# Altium footprint library Anten-Tracker.PcbLib: 36 footprints (part 2 of 3)
Each footprint in its own frame and in the unit in brackets; x right, y up, seen from the top. Pads: shape width x height; smd on the part's side, far side on the other; paste and mask are expansions set on the pad; w line width, h text height; cw(c..) or ccw(c..) is an arc to the next point about the centre after c.
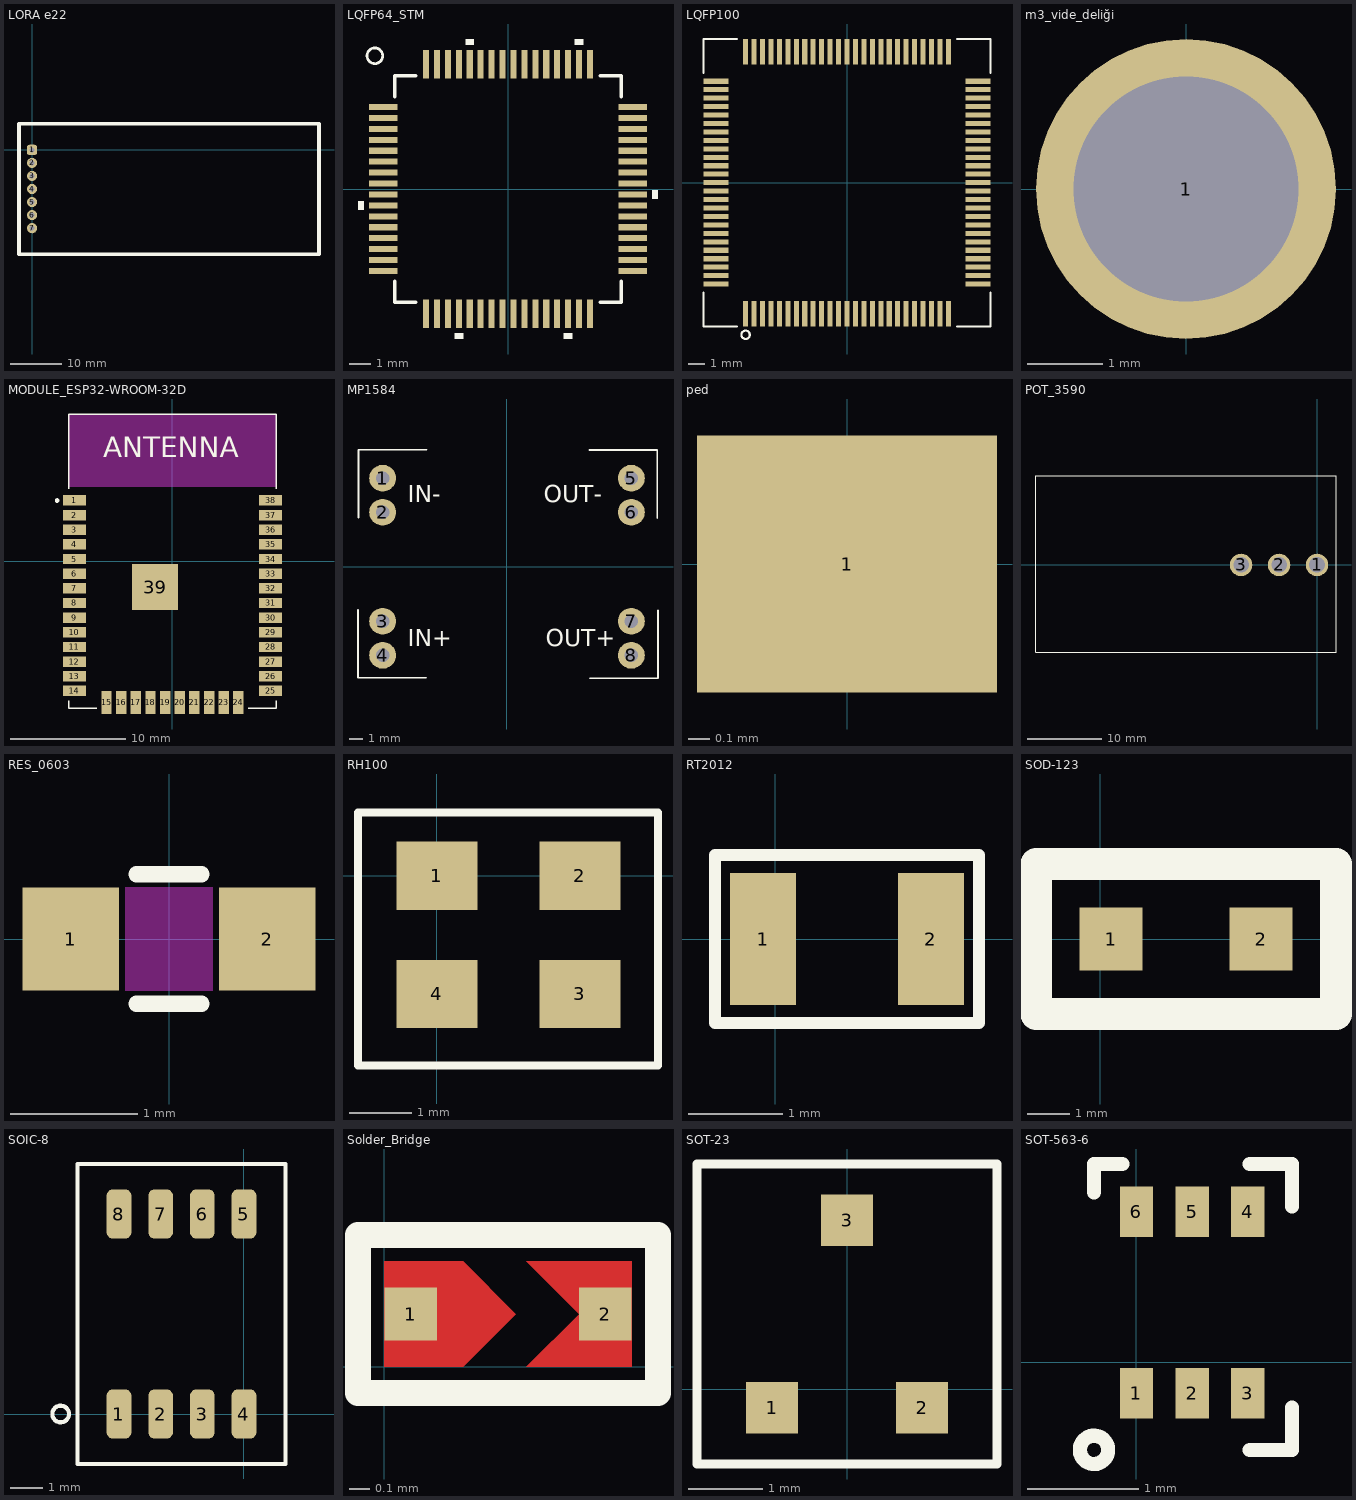
[diagram p1: the footprints below, top view; thin cyan lines are the x and y axes]

## LORA e22 [mm]
pads (7):
  rrect50% 2x2 hole 1 mask+0.05: 1(0,0)
  round 2 hole 1 mask+0.05: 2(0,-2.54) 3(0,-5.08) 4(0,-7.62) 5(0,-10.16) 6(0,-12.7) 7(0,-15.24)
Top Overlay:
  lines w0.762: -2.54,-20.32 55.88,-20.32 55.88,5.08 -2.54,5.08 -2.54,-20.32
3D body "E22-400T30D.STEP": height 8.1, standoff -5.52, extent -1.524,-19.428 53.976,4.572

## LQFP64_STM [mm]
pads (64):
  rect 1.302x0.279 smd paste-1 mask+0.508: 1(-5.706,3.75) 2(-5.706,3.25) 3(-5.706,2.75) 4(-5.706,2.25) 5(-5.706,1.75) 6(-5.706,1.25) 7(-5.706,0.75) 8(-5.706,0.25) 9(-5.706,-0.25) 10(-5.706,-0.75) 11(-5.706,-1.25) 12(-5.706,-1.75) 13(-5.706,-2.25) 14(-5.706,-2.75) 15(-5.706,-3.25) 16(-5.706,-3.75) 33(5.706,-3.75) 34(5.706,-3.25) 35(5.706,-2.75) 36(5.706,-2.25) 37(5.706,-1.75) 38(5.706,-1.25) 39(5.706,-0.75) 40(5.706,-0.25) 41(5.706,0.25) 42(5.706,0.75) 43(5.706,1.25) 44(5.706,1.75) 45(5.706,2.25) 46(5.706,2.75) 47(5.706,3.25) 48(5.706,3.75)
  rect 0.279x1.302 smd paste-1 mask+0.508: 17(-3.75,-5.706) 18(-3.25,-5.706) 19(-2.75,-5.706) 20(-2.25,-5.706) 21(-1.75,-5.706) 22(-1.25,-5.706) 23(-0.75,-5.706) 24(-0.25,-5.706) 25(0.25,-5.706) 26(0.75,-5.706) 27(1.25,-5.706) 28(1.75,-5.706) 29(2.25,-5.706) 30(2.75,-5.706) 31(3.25,-5.706) 32(3.75,-5.706) 49(3.75,5.706) 50(3.25,5.706) 51(2.75,5.706) 52(2.25,5.706) 53(1.75,5.706) 54(1.25,5.706) 55(0.75,5.706) 56(0.25,5.706) 57(-0.25,5.706) 58(-0.75,5.706) 59(-1.25,5.706) 60(-1.75,5.706) 61(-2.25,5.706) 62(-2.75,5.706) 63(-3.25,5.706) 64(-3.75,5.706)
Top Overlay:
  circle w0.127: c-6.096,6.096 r0.359
  region: -1.559,6.611 -1.94,6.611 -1.94,6.865 -1.559,6.865
  region: 3.441,6.611 3.06,6.611 3.06,6.865 3.441,6.865
  region: 6.611,-0.059 6.865,-0.059 6.865,-0.44 6.611,-0.44
  region: 2.94,-6.611 2.559,-6.611 2.559,-6.865 2.94,-6.865
  region: -2.06,-6.611 -2.441,-6.611 -2.441,-6.865 -2.06,-6.865
  region: -6.611,-0.56 -6.865,-0.56 -6.865,-0.941 -6.611,-0.941
  lines w0.152: -5.182,-4.222 -5.182,-5.182 -4.222,-5.182 ; -5.182,4.222 -5.182,5.182 -4.222,5.182 ; 4.222,-5.182 5.182,-5.182 5.182,-4.222 ; 4.222,5.182 5.182,5.182 5.182,4.222
3D body "LQFP64_STM.step": height 1.6, standoff 0, extent -6.007,-6.007 6.007,6.007

## LQFP100 [mm]
pads (100):
  rect 0.3x1.5 smd paste-1 mask+0.102: 1(-6,-7.75) 2(-5.5,-7.75) 3(-5,-7.75) 4(-4.5,-7.75) 5(-4,-7.75) 6(-3.5,-7.75) 7(-3,-7.75) 8(-2.5,-7.75) 9(-2,-7.75) 10(-1.5,-7.75) 11(-1,-7.75) 12(-0.5,-7.75) 13(0,-7.75) 14(0.5,-7.75) 15(1,-7.75) 16(1.5,-7.75) 17(2,-7.75) 18(2.5,-7.75) 19(3,-7.75) 20(3.5,-7.75) 21(4,-7.75) 22(4.5,-7.75) 23(5,-7.75) 24(5.5,-7.75) 25(6,-7.75) 51(6,7.75) 52(5.5,7.75) 53(5,7.75) 54(4.5,7.75) 55(4,7.75) 56(3.5,7.75) 57(3,7.75) 58(2.5,7.75) 59(2,7.75) 60(1.5,7.75) 61(1,7.75) 62(0.5,7.75) 63(0,7.75) 64(-0.5,7.75) 65(-1,7.75) 66(-1.5,7.75) 67(-2,7.75) 68(-2.5,7.75) 69(-3,7.75) 70(-3.5,7.75) 71(-4,7.75) 72(-4.5,7.75) 73(-5,7.75) 74(-5.5,7.75) 75(-6,7.75)
  rect 1.5x0.3 smd paste-1 mask+0.102: 26(7.75,-6) 27(7.75,-5.5) 28(7.75,-5) 29(7.75,-4.5) 30(7.75,-4) 31(7.75,-3.5) 32(7.75,-3) 33(7.75,-2.5) 34(7.75,-2) 35(7.75,-1.5) 36(7.75,-1) 37(7.75,-0.5) 38(7.75,0) 39(7.75,0.5) 40(7.75,1) 41(7.75,1.5) 42(7.75,2) 43(7.75,2.5) 44(7.75,3) 45(7.75,3.5) 46(7.75,4) 47(7.75,4.5) 48(7.75,5) 49(7.75,5.5) 50(7.75,6) 76(-7.75,6) 77(-7.75,5.5) 78(-7.75,5) 79(-7.75,4.5) 80(-7.75,4) 81(-7.75,3.5) 82(-7.75,3) 83(-7.75,2.5) 84(-7.75,2) 85(-7.75,1.5) 86(-7.75,1) 87(-7.75,0.5) 88(-7.75,0) 89(-7.75,-0.5) 90(-7.75,-1) 91(-7.75,-1.5) 92(-7.75,-2) 93(-7.75,-2.5) 94(-7.75,-3) 95(-7.75,-3.5) 96(-7.75,-4) 97(-7.75,-4.5) 98(-7.75,-5) 99(-7.75,-5.5) 100(-7.75,-6)
Top Overlay:
  circle w0.127: c-6,-9 r0.25
  lines w0.127: -8.5,-6.5 -8.5,-8.5 -6.5,-8.5 ; -8.5,6.5 -8.5,8.5 -6.5,8.5 ; 6.5,-8.5 8.5,-8.5 8.5,-6.5 ; 6.5,8.5 8.5,8.5 8.5,6.5
3D body "LQFP_0.5P_100.STEP": height 1.65, standoff -0.05, extent -8.004,-8.004 8.004,8.004

## m3_vide_deliği [mm]
pads (1):
  round 4 hole 3 paste-1 mask+0.102: 1(0,0)

## MODULE_ESP32-WROOM-32D [mm]
height 3.2
pads (39):
  rect 2x0.9 smd: 1(-8.5,5.26) 2(-8.5,3.99) 3(-8.5,2.72) 4(-8.5,1.45) 5(-8.5,0.18) 6(-8.5,-1.09) 7(-8.5,-2.36) 8(-8.5,-3.63) 9(-8.5,-4.9) 10(-8.5,-6.17) 11(-8.5,-7.44) 12(-8.5,-8.71) 13(-8.5,-9.98) 14(-8.5,-11.25) 25(8.5,-11.25) 26(8.5,-9.98) 27(8.5,-8.71) 28(8.5,-7.44) 29(8.5,-6.17) 30(8.5,-4.9) 31(8.5,-3.63) 32(8.5,-2.36) 33(8.5,-1.09) 34(8.5,0.18) 35(8.5,1.45) 36(8.5,2.72) 37(8.5,3.99) 38(8.5,5.26)
  rect 0.9x2 smd: 15(-5.715,-12.25) 16(-4.445,-12.25) 17(-3.175,-12.25) 18(-1.905,-12.25) 19(-0.635,-12.25) 20(0.635,-12.25) 21(1.905,-12.25) 22(3.175,-12.25) 23(4.445,-12.25) 24(5.715,-12.25)
  rect 4x4 smd: 39(-1.5,-2.25)
Top Overlay:
  circle w0.2: c-10,5.25 r0.1
  lines w0.127: -9,-12.1 -9,-12.75 -6.55,-12.75 ; -9,6.25 -9,12.75 9,12.75 9,6.25 ; 6.55,-12.75 9,-12.75 9,-12.1
  text "ANTENNA" at -6,9 h1.78
Keep-Out Layer:
  region: 9,6.45 -9,6.45 -9,12.75 9,12.75
3D body "step_temp.STEP": height 3.25, standoff 0, extent -9,-12.75 9,12.75

## MP1584 [mm]
pads (8):
  round 2 hole 1 paste-1 mask+0.508: 1(-9.271,6.604) 2(-9.271,4.064) 3(-9.271,-4.064) 4(-9.271,-6.604) 5(9.271,6.604) 6(9.271,4.064) 7(9.271,-4.064) 8(9.271,-6.604)
Top Overlay:
  lines w0.127: -11.11,-3.198 -11.11,-8.278 -6.03,-8.278 ; -11.074,3.647 -11.074,8.727 -5.994,8.727 ; 6.13,8.707 11.21,8.707 11.21,3.627 ; 6.179,-8.316 11.259,-8.316 11.259,-3.236
  text "OUT-" at 2.748,4.8 h1.27
  text "OUT+" at 2.875,-5.923 h1.27
  text "IN-" at -7.412,4.8 h1.27
  text "IN+" at -7.412,-5.923 h1.27
3D body "D-SUN_dcdc_step_down_SIMPLE.step": height 4.1, standoff 0, extent -10.969,-8.172 11.131,8.628

## ped [mm]
pads (1):
  rect 1.4x1.2 smd paste-1 mask+0.102: 1(0,0)

## POT_3590 [mm]
pads (3):
  round 3 hole 2.08 paste-1 mask+0.508: 1(0,0) 2(-5.08,0) 3(-10.16,0)
Top Overlay:
  lines w0.127: -37.592,-11.684 -37.592,11.938 2.54,11.938 2.54,-11.684 -37.592,-11.684
3D body "Precision Potentiometer_3590S-2-502L.stp": height 23.25, standoff -3.65, extent -36.976,-11.176 1.924,11.424

## RES_0603 [mil]
pads (2):
  rect 29.78x32 smd paste+0 mask+0: 1(-30.39,0) 2(30.39,0)
Top Layer keep-out:
  region: -13.5,-14 -13.5,14 13.5,14 13.5,-14
Top Overlay:
  lines w5: -10,-20 10,-20 ; -10,20 10,20
Keep-Out Layer:
  region: -13.5,-16 -13.5,16 13.5,16 13.5,-16
3D body "RC0603N_YAG.step": height 27.99, standoff 0, extent -31.5,-15.98 31.5,15.98

## RH100 [mm]
pads (4):
  rect 1.3x1.1 smd paste-1 mask+0.508: 1(0,0) 2(2.3,0) 3(2.3,-1.9) 4(0,-1.9)
Top Overlay:
  lines w0.127: -1.27,-3.048 -1.27,1.016 3.556,1.016 3.556,-3.048 -1.27,-3.048
3D body "rh100.SLDPRT": height 0.66, standoff 0, extent -0.457,-2.266 2.743,0.234

## RT2012 [mm]
pads (2):
  rect 0.7x1.4 smd paste-1 mask+0.102: 1(-0.127,0) 2(1.651,0)
Top Overlay:
  lines w0.127: -0.635,-0.889 2.159,-0.889 2.159,0.889 -0.635,0.889 -0.635,-0.889
3D body "EPSON_FC1610AN_X1A000121000500.STEP": height 0.5, standoff 0, extent -0.063,-0.525 1.587,0.525

## SOD-123 [mm]
pads (2):
  rect 1.5x1.5 smd mask+0.05: 1(0.254,0) 2(3.81,0)
Top Overlay:
  lines w0.762: -1.524,-1.778 -1.524,1.778 5.588,1.778 5.588,-1.778 -1.524,-1.778
3D body "sod123 v4.step": height 1.2, standoff 0, extent 0.157,-0.85 3.907,0.85

## SOIC-8 [mm]
pads (8):
  rrect50% 0.75x1.5 smd paste-1 mask+0.508: 1(-3.81,0) 2(-2.54,0) 3(-1.27,0) 4(0,0) 5(0,6.096) 6(-1.27,6.096) 7(-2.54,6.096) 8(-3.81,6.096)
Top Overlay:
  circle w0.127: c-5.588,0 r0.254
  lines w0.127: -5.08,-1.524 1.27,-1.524 1.27,7.62 -5.08,7.62 -5.08,-1.524
3D body "SOIC8.STEP": height 1.5, standoff 0, extent -4.355,0.098 0.545,5.998

## Solder_Bridge [mil]
pads (2):
  rect 10x10 smd paste-39.37 mask+0: 1(5,10) 2(42,10)
Top Layer:
  region: 0,0 0,20 15,20 15,0
  region: 15,0 15,10 25,10
  region: 25,10 15,20 15,10
  region: 27,0 47,0 47,20 27,20 37,10
Top Overlay:
  lines w5: -5,-5 -5,25 52,25 52,-5 0,-5 -5,-5

## SOT-23 [mm]
pads (3):
  rect 0.7x0.7 smd paste-1 mask+0.508: 1(-1.016,-0.254) 2(1.016,-0.254) 3(0,2.286)
Top Overlay:
  lines w0.127: -2.032,-1.016 2.032,-1.016 2.032,3.048 -2.032,3.048 -2.032,-1.016
3D body "SOT23-3.stp": height 1.2, standoff 0.02, extent -1.5,-0.402 1.5,2.434

## SOT-563-6 [mm]
pads (6):
  rect 0.3x0.45 smd paste-1 mask+0.102: 1(0,-0.279) 2(0.5,-0.279) 3(1,-0.279) 4(1,1.35) 5(0.5,1.35) 6(0,1.35)
Top Overlay:
  circle w0.127: c-0.381,-0.787 r0.127
  lines w0.127: -0.381,1.524 -0.381,1.778 -0.127,1.778 ; 1.016,-0.787 1.397,-0.787 1.397,-0.406 ; 1.016,1.778 1.397,1.778 1.397,1.397
3D body "SOT563.STEP": height 0.53, standoff -0.02, extent -0.292,-0.279 1.308,1.321